# Altium schematic symbol library TVS（无极性）.SCHLIB: 1 symbol
Pins are listed as number, name and electrical type; pins without a type are passive.

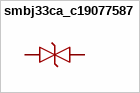
[diagram p0: symbol smbj33ca_c19077587]

## smbj33ca_c19077587
designator D??  (value not drawn)
极性:双向;反向截止电压(Vrwm):33V;钳位电压:53.3V;峰值脉冲电流(Ipp):11.26A@10/1000us;峰值脉冲功率(Ppp):600W@10/1000us;击穿电压:40.6V;; Manufacturer: R+O(宏嘉诚); AddInBom: yes; ModelId: 56a671846d664f15ac0751d5510bb56a; ModelName: SMB_L4.6-W3.6-LS5.4-BI; ModelTransform: 212.598,142.5194,0,0,0,0,0,0,0; Polarity: 双向; Reverse Stand-Off Voltage (Vrwm): 33V; Clamping Voltage: 53.3V; Voltage - Breakdown: 40.6V; Reverse Leakage Current (Ir): 5uA; Number of Channels: 单路; level of protection: IEC 61000-4-2; Type: TVS; Symbol: SMBJ33CA_C19077587; LCSC Part Name: 双向TVS 33V截止 峰值浪涌电流：11.26A@10/1000us; SupplierPart: C19077587; ManufacturerPart: SMBJ33CA; Supplier Footprint: DO-214AA(SMB); JLCPCB Part Class: Extended Part; Datasheet: https://item.szlcsc.com/datasheet/SMBJ33CA/20275672.html; Supplier: LCSC; ConvertToPcb: yes; FootprintName: SMB_L4.6-W3.6-LS5.4-BI; Peak Pulse Current (Ipp): 11.26A@10/1000us; Peak Pulse Power Dissipation (Ppp): 600W@10/1000us; Operating Temperature: -55℃~+150℃
footprint SMB_L4.6-W3.6-LS5.4-BI
pins: 1, 2